# Altium integrated library HMS.PhaoDien.V5.1.IntLib: 91 symbols
Pins are listed as number, name and electrical type; pins without a type are passive.

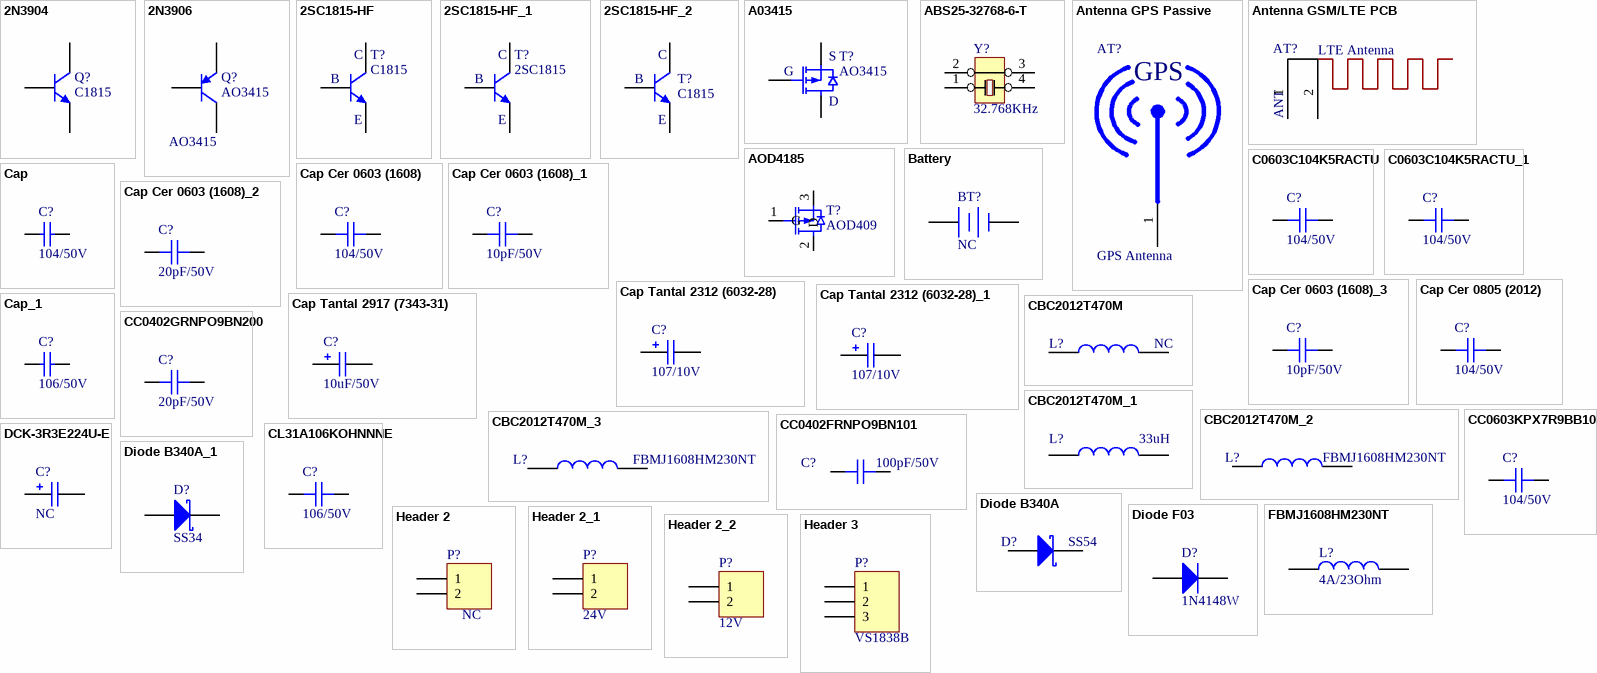
[diagram p0: symbols 2N3904 to Header 3]

## 2N3904
designator Q?, comment C1815
Trans C1815 NPN 0.15A/50V SMD SOT23; MFR: LinhKienChatLuong; MPN: 2SC1815; Published: 8-Jun-2000; LatestRevisionDate: 15-Jan-2003; LatestRevisionNote: PCB Footprint 'BCY-W3/D4.7' replaced; DatasheetVersion: 1997; PackageVersion: Sep-1998; PackageReference: TO-92A; Publisher: Altium Limited; PackageDescription: TO, Flat Index; 3 In-Line, Axial Leads; Body Dia. 4.5mm; Leads 0.51 x 0.48 mm (max); ComponentLink1Description: Manufacturer Link; ComponentLink1URL: http://www.fairchildsemi.com/; ComponentLink2Description: Datasheet; ComponentLink2URL: http://www.fairchildsemi.com/ds/2N%2F2N3904.pdf; Category: Transistor NPN; Value: C1815
footprint SOT23-3
pins: 1 B, 2 E, 3 C

## 2N3906
designator Q?, comment AO3415
Mosfet P Channel; MFR: Alpha & Omega Semiconductor Inc.; Published: 8-Jun-2000; LatestRevisionDate: 15-Jan-2003; LatestRevisionNote: PCB Footprint 'BCY-W3/D4.7' replaced; DatasheetVersion: 1997; PackageVersion: Sep-1998; PackageReference: TO-92A; Publisher: Altium Limited; PackageDescription: TO, Flat Index; 3 In-Line, Axial Leads; Body Dia. 4.5mm; Leads 0.51 x 0.48 mm (max); ComponentLink1Description: Manufacturer Link; ComponentLink1URL: http://www.fairchildsemi.com/; ComponentLink2Description: Datasheet; ComponentLink2URL: http://www.fairchildsemi.com/ds/2N%2F2N3906.pdf; Category: Transistors - FETs, MOSFETs - Single; MPN: AO3415; Value: AO3415
footprint SOT23-3
pins: 1 B, 2 E, 3 C

## 2SC1815-HF
designator T?, comment C1815
Trans C1815 NPN 0.15A/50V SMD SOT23; MPN: 2SC1815; Value: C1815
footprint SOT23-3
footprint SOT23
pins: 1, 2, 3
text: C; B; E

## 2SC1815-HF_1
designator T?, comment 2SC1815
Trans C1815 NPN 0.15A/50V SMD SOT23; MFR: LinhKienChatLuong; Value: 2SC1815; Category: Transistor NPN; MPN: 2SC1815
footprint SOT23-3
footprint SOT23
pins: 1, 2, 3
text: C; B; E

## 2SC1815-HF_2
designator T?, comment C1815
Transistor  50V 150mA  NPN SMD SOT-23; MPN: 2SC1815; Value: C1815
footprint SOT23-3
footprint SOT23
pins: 1, 2, 3
text: C; B; E

## A03415
designator T?, comment AO3415
Mosfet P Channel; MPN: AO3415; Category: Transistor PNP; Value: AO3415
footprint SOT23-3
pins: 1 G, 2 S, 3 D

## ABS25-32768-6-T
designator Y?, comment 32.768KHz
CRYSTAL 32.768KHZ 6PF SMD; Manufacturer: Abracon Corporation; Manufacturer Part Number: ABS25-32.768KHZ-6-T; MPN: ABS25-32768-6-T; Frequency Tolerance: ±20ppm; ESR (Equivalent Series Resistance): 50 kOhm; Operating Mode: Fundamental; Supplier 1: Digi-Key; RoHS: RoHS Compliant; Category: Crystals and Oscillators; Stock 1: 51000; Pricing 1: 3000=0.285, 6000=0.2755, 15000=0.266 (USD); Packaging: Tape & Reel (TR); Type: kHz Crystal (Tuning Fork); Frequency: 32.768kHz; Frequency Stability: -; Load Capacitance: 6pF; Operating Temperature: -40°C ~ 85°C; Ratings: -; Mounting Type: Surface Mount; Package / Case: 4-SOJ, 5.50mm pitch; Size / Dimension: 0.315" L x 0.150" W (8.00mm x 3.80mm); Height: 0.098" (2.50mm); ComponentLink1URL: http://www.abracon.com/Resonators/abs25.pdf; ComponentLink1Description: http://www.abracon.com/Resonators/abs25.pdf; Supplier Part Number 1: 535-10240-2-ND; Value: 32.768KHz
footprint ABS25-32768-6-T (CRYSTAL 32.768KHZ 6PF SMD)
pins: 1, 2, 3, 4

## Antenna GPS Passive
designator AT?, comment GPS Antenna
SWG018-35, Passive antenna 25x25x4mm, pin length 3.5mm, Three-proof varnish; MPN: SW25073IB93; Value: GPS Antenna
footprint ANT GPS Passive
pins: 1 105
text: GPS

## Antenna GSM/LTE PCB
designator AT?, comment LTE Antenna
MPN: NC; Value: LTE Antenna
footprint Antenna LTE/4G PCB
pins: 1 46, 2 47
text: ANT

## AOD4185
designator T?, comment AOD409
MOSFET P-CH 60V 26A TO252; Manufacturer: International Rectifier; FET Type: MOSFET P-Channel, Metal Oxide; FET Feature: Logic Level Gate; Drain to Source Voltage (Vdss): 20V; Current - Continuous Drain (Id) @ 25° C: 3.7A (Ta); Rds On (Max) @ Id, Vgs: 65 mOhm @ 3.7A, 4.5V; Vgs(th) (Max) @ Id: 1.2V @ 250µA; Gate Charge (Qg) @ Vgs: 12nC @ 5V; Input Capacitance (Ciss) @ Vds: 633pF @ 10V; Power - Max: 1.3W; Supplier 1: Digi-Key; RoHS: RoHS Compliant; Category: Discrete Semiconductor Products; Stock 1: 4068; Pricing 1: 1=0.6, 10=0.34, 25=0.2932, 50=0.2468, 100=0.2209, 250=0.20072, 500=0.18058, 1000=0.16904 (USD); Packaging: Digi-Reel®; Mounting Type: Surface Mount; Package / Case: TO-236-3, SC-59, SOT-23-3; Supplier Device Package: Micro3™/SOT-23; ComponentLink1URL: http://www.irf.com/product-info/datasheets/data/irlml6402gpbf.pdf; ComponentLink1Description: http://www.irf.com/product-info/datasheets/data/irlml6402gpbf.pdf; Supplier Part Number 1: IRLML6402GTRPBFDKR-ND; Value: AOD409; MPN: AOD409
footprint TO252
pins: 1 G, 2 D, 3 S

## Battery
designator BT?, comment NC
Published: 24-Mar-1999; LatestRevisionDate: 17-Jul-2002; LatestRevisionNote: Re-released for DXP Platform.; PackageReference: BAT-2; Publisher: Altium Limited; PackageDescription: Battery; 2 Leads; Value: NC
footprint DE PIN NHO 3V3 (Footprint not found)
pins: 1 +, 2 -

## C0603C104K5RACTU
designator C?, comment 104/50V
Tụ Ceramic 104/50V 10% 0603; MPN: CC0603KPX7R9BB104; MFR: YAGEO; CompanyID: VT-00982; Solder: SMT; Value: 104/50V; Category: Ceramic Capacitors
footprint CAPC-0603 (1608) (Resistor, Chip; 1.60 mm L X 0.80 mm W X 0.50 mm H body)
footprint CAP_CERAMIC_0603(1608mm) (Chip Capacitor, Body 1.6x0.8mm, IPC High Density)
footprint CAP_CERAMIC_0402(1005) (Chip Inductor, Body 1.0x0.5mm, IPC High Density)
pins: 1, 2

## C0603C104K5RACTU_1
designator C?, comment 104/50V
CAP CER 0.1UF 50V X5R 0402; MPN: CC0402KRX5R9BB104; CompanyID: VT-00982; Solder: SMT; Value: 104/50V; Category: CAPACITOR
footprint CAP_CERAMIC_0402(1005) (Chip Inductor, Body 1.0x0.5mm, IPC High Density)
pins: 1, 2

## Cap
designator C?, comment 104/50V
CAP CER 0.1UF 50V X5R 0402; MPN: CC0402KRX5R9BB104; Published: 8-Jun-2000; LatestRevisionDate: 17-Jul-2002; LatestRevisionNote: Re-released for DXP Platform.; PackageReference: RAD-0.3; Publisher: Altium Limited; Value: 104/50V
footprint CAP_CERAMIC_0402(1005) (Chip Inductor, Body 1.0x0.5mm, IPC High Density)
pins: 1, 2

## Cap Cer 0603 (1608)
designator C?, comment 104/50V
CAP CER 0.1UF 50V X5R 0402; MPN: CC0402KRX5R9BB104; MFR: YAGEO; Published: 8-Jun-2000; LatestRevisionDate: 17-Jul-2002; LatestRevisionNote: Re-released for DXP Platform.; PackageReference: RAD-0.3; Publisher: Altium Limited; Value: 104/50V; Category: Ceramic Capacitors
footprint CAP_CERAMIC_0603(1608mm) (Chip Capacitor, Body 1.6x0.8mm, IPC High Density)
footprint CAP_CERAMIC_0402(1005) (Chip Inductor, Body 1.0x0.5mm, IPC High Density)
pins: 1, 2

## Cap Cer 0603 (1608)_1
designator C?, comment 10pF/50V
CAP CER 0.1UF 50V X5R 0402; MPN: CC0402KRX5R9BB104; MFR: YAGEO; Published: 8-Jun-2000; LatestRevisionDate: 17-Jul-2002; LatestRevisionNote: Re-released for DXP Platform.; PackageReference: RAD-0.3; Publisher: Altium Limited; Value: 10pF/50V; Category: Ceramic Capacitors
footprint CAP_CERAMIC_0603(1608mm) (Chip Capacitor, Body 1.6x0.8mm, IPC High Density)
footprint CAP_CERAMIC_0402(1005) (Chip Inductor, Body 1.0x0.5mm, IPC High Density)
pins: 1, 2

## Cap Cer 0603 (1608)_2
designator C?, comment 20pF/50V
CAP CER 20PF 50V C0G/NP0 0402; MPN: CQ0402FRNPO9BN200; Published: 8-Jun-2000; LatestRevisionDate: 17-Jul-2002; LatestRevisionNote: Re-released for DXP Platform.; PackageReference: RAD-0.3; Publisher: Altium Limited; Value: 20pF/50V
footprint CAP_CERAMIC_0402(1005) (Chip Inductor, Body 1.0x0.5mm, IPC High Density)
pins: 1, 2

## Cap Cer 0603 (1608)_3
designator C?, comment 10pF/50V
CAP CER 10pF 50V NP0 0402; MPN: CC0402JRNPO9BN100; Published: 8-Jun-2000; LatestRevisionDate: 17-Jul-2002; LatestRevisionNote: Re-released for DXP Platform.; PackageReference: RAD-0.3; Publisher: Altium Limited; Value: 10pF/50V
footprint CAP_CERAMIC_0402(1005) (Chip Inductor, Body 1.0x0.5mm, IPC High Density)
pins: 1, 2

## Cap Cer 0805 (2012)
designator C?, comment 104/50V
CAP CER 0.1UF 50V X5R 0402; MPN: CC0402KRX5R9BB104; Published: 8-Jun-2000; LatestRevisionDate: 17-Jul-2002; LatestRevisionNote: Re-released for DXP Platform.; PackageReference: RAD-0.3; Publisher: Altium Limited; Value: 104/50V
footprint CAP_CERAMIC_0402(1005) (Chip Inductor, Body 1.0x0.5mm, IPC High Density)
pins: 1, 2

## Cap Tantal 2312 (6032-28)
designator C?, comment 107/10V
Cap Tantal 10uF/6.3V 10% 1206; MPN: 293D106X96R3A2TE3; Value: 107/10V
footprint CAP_TANTAL_1206(3216-18) (Chip Capacitor, Body 3.2x1.6mm, IPC High Density)
pins: 1, 2

## Cap Tantal 2312 (6032-28)_1
designator C?, comment 107/10V
Capacitor Tantalum 100uF/10V 2312(6032-28); MPN: TPSC107K010R0100; Value: 107/10V
footprint CAP_TANTAL_2312(6032-28) (Chip Resistor, Body 6.0x3.2mm, IPC High Density)
pins: 1, 2

## Cap Tantal 2917 (7343-31)
designator C?, comment 10uF/50V
Capacitor Alum 10uF/50V SMD 5x5.4mm; MPN: AVS106M50C12T-F; Value: 10uF/50V
footprint CAP_TANTAL_2917(7343-31) (Chip Resistor, Body 6.0x3.2mm, IPC High Density)
footprint CAP_ALUM_SMD_5054_TYPE_C
pins: 1, 2

## Cap_1
designator C?, comment 106/50V
CAP Ceramic 106/50V 10% 1206; MPN: CL31A106KBHNNNE; Published: 8-Jun-2000; LatestRevisionDate: 17-Jul-2002; LatestRevisionNote: Re-released for DXP Platform.; PackageReference: RAD-0.3; Publisher: Altium Limited; Value: 106/50V
footprint CAP_CERAMIC_1810
footprint CAP_CERAMIC_1206(3216-18) (Chip Capacitor, Body 3.2x1.6mm, IPC High Density)
pins: 1, 2

## CBC2012T470M
designator L?, comment NC
47nH; Manufacturer: Taiyo Yuden; Manufacturer Part Number: CBC2012T470M; Inductance: 200nH; Current Rating: 150mA; Current - Saturation: 120mA; Tolerance: ±20%; Shielding: Unshielded; DC Resistance (DCR): 7.54 Ohm Max; Frequency - Self Resonant: 11MHz; Frequency - Test: 2.52MHz; Supplier 1: Digi-Key; RoHS: RoHS Compliant; Category: Inductors, Coils, Chokes; Stock 1: 108934; Pricing 1: 1=0.2, 10=0.188, 50=0.1762, 100=0.1645, 500=0.12926, 1000=0.10575 (USD); Packaging: Cut Tape (CT); Type: -; Material - Core: -; Q @ Freq: -; Operating Temperature: -40°C ~ 105°C; Package / Case: 0805 (2012 Metric); Size / Dimension: 0.079" L x 0.049" W x 0.049" H (2.00mm x 1.25mm x 1.25mm); Mounting Type: Surface Mount; ComponentLink1URL: http://www.yuden.co.jp/ut/product/category/inductor/CBC2012T470M.pdf; ComponentLink1Description: http://www.yuden.co.jp/ut/product/category/inductor/CBC2012T470M.pdf; Supplier Part Number 1: 587-1605-1-ND; Value: NC; MPN: NC
footprint Inductor_0603 (HK1608R22J-T)
pins: 1, 2

## CBC2012T470M_1
designator L?, comment 33uH
INDUCTOR 33uH SMD CDRH127-330; Manufacturer: Taiyo Yuden; Manufacturer Part Number: CBC2012T470M; Inductance: 47uH; Current Rating: 150mA; Current - Saturation: 120mA; Tolerance: ±20%; Shielding: Unshielded; DC Resistance (DCR): 7.54 Ohm Max; Frequency - Self Resonant: 11MHz; Frequency - Test: 2.52MHz; Supplier 1: Digi-Key; RoHS: RoHS Compliant; Category: Inductors, Coils, Chokes; Stock 1: 108934; Pricing 1: 1=0.2, 10=0.188, 50=0.1762, 100=0.1645, 500=0.12926, 1000=0.10575 (USD); Packaging: Cut Tape (CT); Type: -; Material - Core: -; Q @ Freq: -; Operating Temperature: -40°C ~ 105°C; Package / Case: 0805 (2012 Metric); Size / Dimension: 0.079" L x 0.049" W x 0.049" H (2.00mm x 1.25mm x 1.25mm); Mounting Type: Surface Mount; ComponentLink1URL: http://www.yuden.co.jp/ut/product/category/inductor/CBC2012T470M.pdf; ComponentLink1Description: http://www.yuden.co.jp/ut/product/category/inductor/CBC2012T470M.pdf; Supplier Part Number 1: 587-1605-1-ND; Value: 33uH; MPN: CDRH127-330
footprint L3A_10x10x4mm
pins: 1, 2

## CBC2012T470M_2
designator L?, comment FBMJ1608HM230NT
Inductor Ferrites 4A SMD 0603; Manufacturer: Taiyo Yuden; Manufacturer Part Number: CBC2012T470M; Inductance: 200nH; Current Rating: 150mA; Current - Saturation: 120mA; Tolerance: ±20%; Shielding: Unshielded; DC Resistance (DCR): 7.54 Ohm Max; Frequency - Self Resonant: 11MHz; Frequency - Test: 2.52MHz; Supplier 1: Digi-Key; RoHS: RoHS Compliant; Category: Inductors, Coils, Chokes; Stock 1: 108934; Pricing 1: 1=0.2, 10=0.188, 50=0.1762, 100=0.1645, 500=0.12926, 1000=0.10575 (USD); Packaging: Cut Tape (CT); Type: -; Material - Core: -; Q @ Freq: -; Operating Temperature: -40°C ~ 105°C; Package / Case: 0805 (2012 Metric); Size / Dimension: 0.079" L x 0.049" W x 0.049" H (2.00mm x 1.25mm x 1.25mm); Mounting Type: Surface Mount; ComponentLink1URL: http://www.yuden.co.jp/ut/product/category/inductor/CBC2012T470M.pdf; ComponentLink1Description: http://www.yuden.co.jp/ut/product/category/inductor/CBC2012T470M.pdf; Supplier Part Number 1: 587-1605-1-ND; Value: FBMJ1608HM230NT; MPN: FBMJ1608HM230NT
footprint Inductor_0603 (HK1608R22J-T)
pins: 1, 2

## CBC2012T470M_3
designator L?, comment FBMJ1608HM230NT
INDUCTOR 200nH 20% 0805 SMD; MFR: Taiyo Yuden; Current Rating: 150mA; Current - Saturation: 120mA; Shielding: Unshielded; DC Resistance (DCR): 7.54 Ohm Max; Frequency - Self Resonant: 11MHz; Frequency - Test: 2.52MHz; Supplier 1: Digi-Key; RoHS: RoHS Compliant; Category: Inductors, Coils, Chokes; Stock 1: 108934; Pricing 1: 1=0.2, 10=0.188, 50=0.1762, 100=0.1645, 500=0.12926, 1000=0.10575 (USD); Packaging: Cut Tape (CT); Type: -; Inductance: 200nH; Tolerance: ±20%; Material - Core: -; Q @ Freq: -; Operating Temperature: -40°C ~ 105°C; Package / Case: 0805 (2012 Metric); Size / Dimension: 0.079" L x 0.049" W x 0.049" H (2.00mm x 1.25mm x 1.25mm); Mounting Type: Surface Mount; ComponentLink1URL: http://www.yuden.co.jp/ut/product/category/inductor/CBC2012T470M.pdf; ComponentLink1Description: http://www.yuden.co.jp/ut/product/category/inductor/CBC2012T470M.pdf; Supplier Part Number 1: 587-1605-1-ND; Value: FBMJ1608HM230NT; MPN: FBMJ1608HM230NT
footprint Inductor_0603 (HK1608R22J-T)
pins: 1, 2

## CC0402FRNPO9BN101
designator C?, comment 100pF/50V
CAP CER 100PF 50V C0G/NPO 0402; MPN: CC0402JRNPO9BN101; MFR: YAGEO; Category: Ceramic Capacitors; Value: 100pF/50V
footprint CAP_CERAMIC_0402(1005) (Chip Inductor, Body 1.0x0.5mm, IPC High Density)
pins: 1, 2

## CC0402GRNPO9BN200
designator C?, comment 20pF/50V
CAP CER 20PF 50V C0G/NPO 0402; MFR: YAGEO; MPN: CC0402GRNPO9BN200; Value: 20pF/50V; Category: Ceramic Capacitors
footprint CAP_CERAMIC_0402(1005) (Chip Inductor, Body 1.0x0.5mm, IPC High Density)
pins: 1, 2

## CC0603KPX7R9BB104
designator C?, comment 104/50V
CAP CER 0.1UF 50V X5R 0402; MPN: CC0402KRX5R9BB104; MFR: YAGEO; Value: 104/50V; Category: Ceramic Capacitors
footprint CAP_CERAMIC_0603(1608mm) (Chip Capacitor, Body 1.6x0.8mm, IPC High Density)
footprint CAP_CERAMIC_0402(1005) (Chip Inductor, Body 1.0x0.5mm, IPC High Density)
pins: 1, 2

## CL31A106KOHNNNE
designator C?, comment 106/50V
CAP Ceramic 106/50V 10% 1206; MPN: CL31A106KBHNNNE; MFR: YAGEO; Value: 106/50V
footprint CAP_CERAMIC_1206(3216-18) (Chip Capacitor, Body 3.2x1.6mm, IPC High Density)
pins: 1, 2

## DCK-3R3E224U-E
designator C?, comment NC
MFR: Elna America; Capacitance: 220mF; Voltage - Rated: 3.3V; Tolerance: -20%, +80%; ESR (Equivalent Series Resistance): 200 Ohm; Lifetime @ Temp.: 1000 Hrs @ 60°C; Published: 24-Mar-1999; LatestRevisionDate: 17-Jul-2002; LatestRevisionNote: Re-released for DXP Platform.; PackageReference: BAT-2; Publisher: Altium Limited; PackageDescription: Battery; 2 Leads; Supplier 1: Digi-Key; MPN: NC; RoHS: RoHS Compliant; Category: Capacitors; Stock 1: 7810; Pricing 1: 1=1.41, 10=1.114, 25=1.0208, 50=0.9652, 100=0.8352, 250=0.7424, 500=0.63104, 1000=0.5568, 2500=0.51968 (USD); Packaging: Bulk; Mounting Type: Surface Mount; Package / Case: Coin, Wide Terminals - Opposite Sides; Lead Spacing: 0.079" (2.00mm); Size / Dimension: 0.268" Dia (6.80mm); Height - Seated (Max): 0.083" (2.10mm); Operating Temperature: -10°C ~ 60°C; ComponentLink1URL: http://media.digikey.com/pdf/Data%20Sheets/Elna%20America%20Inc/DC_DCKe.pdf; ComponentLink1Description: http://media.digikey.com/pdf/Data%20Sheets/Elna%20America%20Inc/DC_DCKe.pdf; Supplier Part Number 1: 604-1007-ND; Value: NC
footprint SPCAP0.22F
pins: 1, 2

## Diode B340A
designator D?, comment SS54
Diode Schottky 5A/40V DO-214AB; Published: 8-Jun-2000; LatestRevisionDate: 17-Jul-2002; LatestRevisionNote: Re-released for DXP Platform.; PackageReference: SMB; Publisher: Altium Limited; Code_JEDEC: DO-214-AA; MPN: SS54; Value: SS54
footprint DO214AC_SMA_1808 (Diode B340, Diode M7)
pins: 1 A, 2 K

## Diode B340A_1
designator D?, comment SS34
Diode Schottky 3A/40V DO-214AB; MFR: Diodes Incorporated; Published: 8-Jun-2000; LatestRevisionDate: 17-Jul-2002; LatestRevisionNote: Re-released for DXP Platform.; PackageReference: SMB; Publisher: Altium Limited; Code_JEDEC: DO-214-AA; Value: SS34; MPN: SS34; Category: Diodes - Rectifiers - Single
footprint DO214AC_SMA_1808 (Diode B340, Diode M7)
pins: 1 A, 2 K

## Diode F03
designator D?, comment 1N4148W
1N4148 T4 SOD-123/1206 1N4148W; MFR: LinhKienChatLuong; Value: 1N4148W; Category: Diode; MPN: 1N4148W
footprint DIODE_F03_1005
pins: 1 A, 2 K

## FBMJ1608HM230NT
designator L?, comment 4A/23Ohm
Inductor Ferrites 4A SMD 0603; MPN: NC; MFR: Taiyo Yuden; Category: Ferrite Beads and Chips; Value: 4A/23Ohm
footprint Inductor_0603 (HK1608R22J-T)
pins: 1, 2

## Header 2
designator P?, comment NC
Header, 2-Pin; LatestRevisionDate: 17-Jul-2002; LatestRevisionNote: Re-released for DXP Platform.; Publisher: Altium Limited; Value: NC; MPN: NC
signal-integrity model Connector
footprint H2_BIG (Euro Block)
pins: 1, 2

## Header 2_1
designator P?, comment 24V
Header, 2-Pin; MPN: NC; LatestRevisionDate: 17-Jul-2002; LatestRevisionNote: Re-released for DXP Platform.; Publisher: Altium Limited
footprint HDR1X2 (Connector; Header; 2 Position)
signal-integrity model Connector
pins: 1, 2

## Header 2_2
designator P?, comment 12V
Header, 2-Pin; MPN: NC; LatestRevisionDate: 17-Jul-2002; LatestRevisionNote: Re-released for DXP Platform.; Publisher: Altium Limited
footprint HDR1X2 (Connector; Header; 2 Position)
signal-integrity model Connector
pins: 1, 2

## Header 3
designator P?, comment VS1838B
Diode Infrared Receiver 38Khz; LatestRevisionDate: 17-Jul-2002; LatestRevisionNote: Re-released for DXP Platform.; Publisher: Altium Limited; Value: VS1838B; MPN: VS1838B
signal-integrity model Connector
footprint IR_RECEIVER (TO, Flat Index; 3 In-Line, Axial Leads; Body Dia. 4.8mm; Leads 0.55 x 0.51 mm (max))
pins: 1, 2, 3

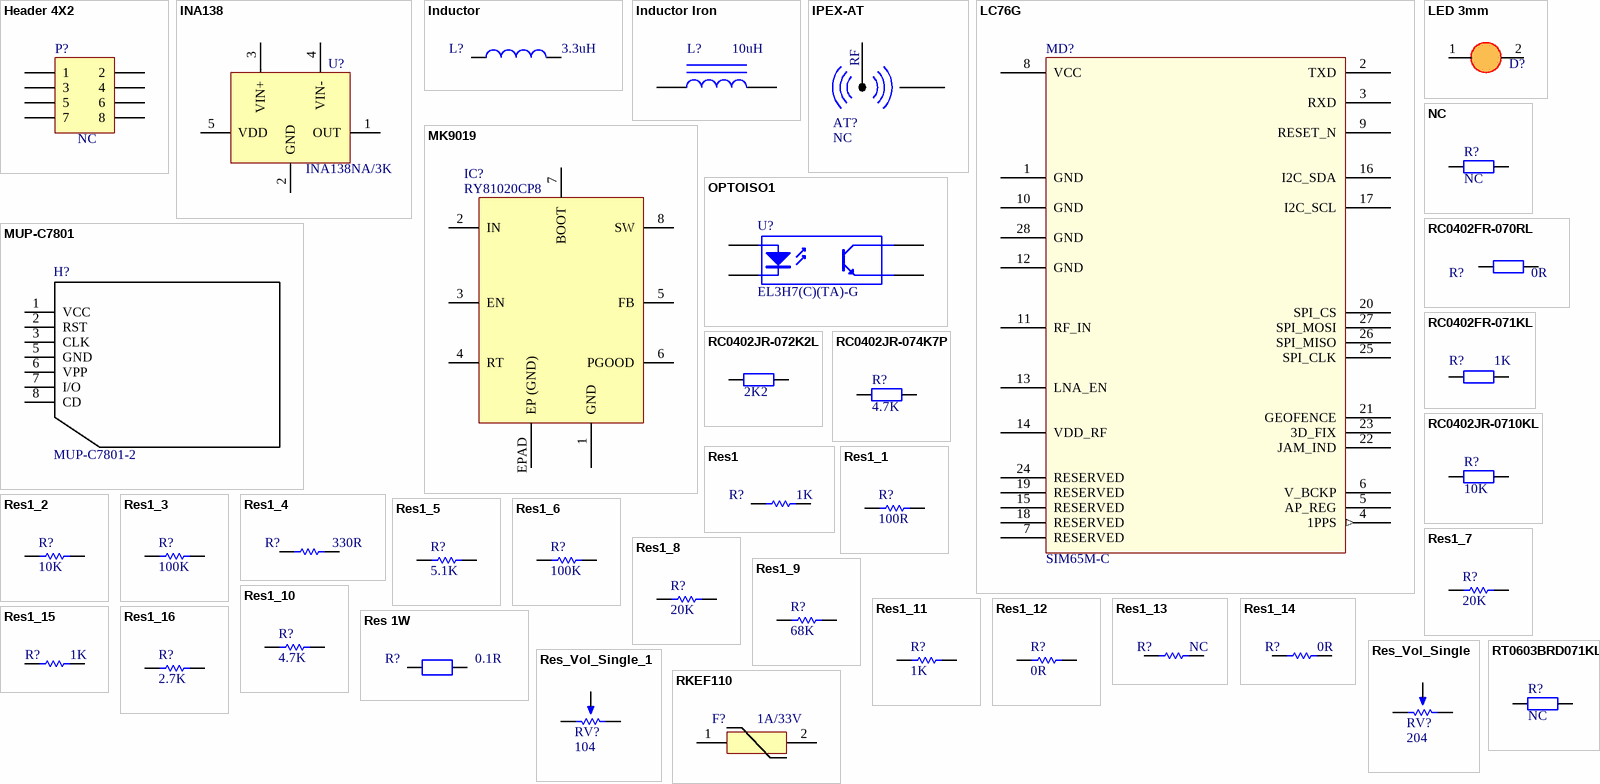
[diagram p1: symbols Header 4X2 to RT0603BRD071KL]

## Header 4X2
designator P?, comment NC
Header, 4-Pin, Dual row; LatestRevisionDate: 17-Jul-2002; LatestRevisionNote: Re-released for DXP Platform.; Publisher: Altium Limited; MPN: NC; Value: NC
footprint HDR2X4 (Connector; Header; 4x2 Position)
signal-integrity model Connector
pins: 1, 2, 3, 4, 5, 6, 7, 8

## INA138
designator U?, comment INA138NA/3K
IC Current Monitor Regulator 0.5% SOT-23-5; Value: INA138NA/3K; MPN: INA138NA/3K
footprint SOT23-5
pins: 1 OUT, 2 GND, 3 VIN+, 4 VIN-, 5 VDD

## Inductor
designator L?, comment 3.3uH
Inductor SMD 3.3uH CD43-3R3 3.5*3*2.1mm; MPN: XRCD43-3R3M; Published: 8-Jun-2000; Revision: July-2002: Re-released for DXP Platform.; Publisher: Altium Limited; Value: 3.3uH
footprint L2.1A_4.5X4X3.2
footprint L2.1A_3.5_3.3
pins: 1, 2

## Inductor Iron
designator L?, comment 10uH
Inductor 10uH 7x7x4mm; MPN: YPRH0704-100M; Published: 24-Mar-1999; LatestRevisionDate: 17-Jul-2002; LatestRevisionNote: Re-released for DXP Platform.; PackageReference: AXIAL-0.9; Publisher: Altium Limited; Value: 10uH
footprint INDUCTOR_SMD_10x10mm
simulation model INDUCTOR (Inductor)
signal-integrity model Inductor Iron
footprint LT54-3R3M (SMD Un-Shielded Inductor)
footprint L3A_7x7x3mm
pins: 1, 2

## IPEX-AT
designator AT?, comment NC
IPEX SMD; MPN: U.FL-R-SMT-1(80); Value: NC
footprint IPEX SMD (IPEX Connector SMD)
pins: 1 5, 2 6
text: RF

## LC76G
designator MD?, comment SIM65M-C
Compact GNSS Module; MPN: SIM65M-C; Value: SIM65M-C
footprint LC76G_GPS (Modlue GNSS)
pins: 1 GND, 2 TXD, 3 RXD, 4 1PPS (out), 5 AP_REG, 6 V_BCKP, 7 RESERVED, 8 VCC, 9 RESET_N, 10 GND, 11 RF_IN, 12 GND, 13 LNA_EN, 14 VDD_RF, 15 RESERVED, 16 I2C_SDA, 17 I2C_SCL, 18 RESERVED, 19 RESERVED, 20 SPI_CS, 21 GEOFENCE, 22 JAM_IND, 23 3D_FIX, 24 RESERVED, 25 SPI_CLK, 26 SPI_MISO, 27 SPI_MOSI, 28 GND

## LED 3mm
designator D?, comment LED Red  (value not drawn)
LED RED SMD 0402; MPN: NCD0603R1; Value: LED Red
footprint LED_0603_GREEN (Chip Capacitor, Body 1.6x0.8mm, IPC High Density)
pins: 1 A, 2 K

## MK9019
designator IC?, comment RY81020CP8
100V Input, Ultra-Low IQ, Synchronous Buck Converter; Value: RY81020CP8; MPN: RY81020CP8
footprint MK9019
pins: 1 GND, 2 IN, 3 EN, 4 RT, 5 FB, 6 PGOOD, 7 BOOT, 8 SW, EPAD EP (GND)

## MUP-C7801
designator H?, comment MUP-C7801-2
Nano Sim card Socket; MFR: OEM; MPN: MUP-C7801-2; Value: MUP-C7801-2
footprint MUP-C7801 (Push-Push NANO-SIM Card)
pins: 1 VCC, 2 RST, 3 CLK, 5 GND, 6 VPP, 7 I/O, 8 CD

## NC
designator R?
MPN: NC; Value: NC; Category: 0402
footprint RES_0402(1005) (Chip Inductor, Body 1.0x0.5mm, IPC High Density)
pins: 1, 2

## OPTOISO1
designator U?, comment EL3H7(C)(TA)-G
Optoisolator Transistor Output 3750Vrms 1 Channel 4-SOP; MFR: Vishay Semiconductor Opto Division; Component Type: IC; MPN: EL3H7(C)(TA)-G; Value: EL3H7(C)(TA)-G; Category: Optoisolators - Transistor, Photovoltaic Output
footprint Opto small
pins: 1, 2, 3, 4

## RC0402FR-070RL
designator R?, comment 0R
RES 0 OHM JUMPER 1/16W 0402; MPN: RC0402FR-070RL; MFR: YAGEO; Category: Chip Resistor - Surface Mount; Value: 0R
footprint RES_0402(1005) (Chip Inductor, Body 1.0x0.5mm, IPC High Density)
pins: 1, 2

## RC0402FR-071KL
designator R?, comment 1K
RES 1K OHM 1% 1/8W 0402; MPN: RC0402FR-071KL; MFR: YAGEO; Voltage Rating: 50V; Power Rating: 1/16W; Value: 1K; Category: 0402; Tolerance: 1%
footprint RES_0402(1005) (Chip Inductor, Body 1.0x0.5mm, IPC High Density)
pins: 1, 2

## RC0402JR-072K2L
designator R?, comment 2K2
RES 2.2K OHM 1/8W 0402; MPN: RC0402JR-072K2L; MFR: YAGEO; Value: 2K2; Category: Chip Resistor - Surface Mount
footprint RES_0402(1005) (Chip Inductor, Body 1.0x0.5mm, IPC High Density)
pins: 1, 2

## RC0402JR-074K7P
designator R?, comment 4.7K
RES SMD 4.7K OHM 5% 1/16W 0402; MPN: RC0402JR-074K7P; MFR: YAGEO; Category: Chip Resistor - Surface Mount; Value: 4.7K
footprint RES_0402(1005) (Chip Inductor, Body 1.0x0.5mm, IPC High Density)
pins: 1, 2

## RC0402JR-0710KL
designator R?, comment 10K
RES 10K OHM 5% 1/8W 0402; MPN: RC0402JR-0710KL; MFR: YAGEO; Category: Chip Resistor - Surface Mount; Value: 10K
footprint RES_0402(1005) (Chip Inductor, Body 1.0x0.5mm, IPC High Density)
pins: 1, 2

## Res1
designator R?, comment 1K
RES 1K OHM 1% 1/8W 0402; MPN: RC0402FR-071KL; Published: 8-Jun-2000; LatestRevisionDate: 17-Jul-2002; LatestRevisionNote: Re-released for DXP Platform.; PackageReference: AXIAL-0.3; Publisher: Altium Limited; Value: 1K
footprint RES_0402(1005) (Chip Inductor, Body 1.0x0.5mm, IPC High Density)
pins: 1, 2

## Res1_1
designator R?, comment 100R
RES 100 OHM 1% 1/8W 0402; MPN: RC0402FR-7W100RL; MFR: Vishay Dale; Published: 8-Jun-2000; LatestRevisionDate: 17-Jul-2002; LatestRevisionNote: Re-released for DXP Platform.; PackageReference: AXIAL-0.3; Publisher: Altium Limited; Value: 100R; Category: Chip Resistor - Surface Mount
footprint RES_0603(1608) (Chip Inductor, Body 0.6x0.3mm, IPC High Density)
footprint RES_0402(1005) (Chip Inductor, Body 1.0x0.5mm, IPC High Density)
pins: 1, 2

## Res1_2
designator R?, comment 10K
RES 10K OHM 5% 1/8W 0402; MPN: RC0402JR-0710KL; Published: 8-Jun-2000; LatestRevisionDate: 17-Jul-2002; LatestRevisionNote: Re-released for DXP Platform.; PackageReference: AXIAL-0.3; Publisher: Altium Limited; Value: 10K
footprint RES_0402(1005) (Chip Inductor, Body 1.0x0.5mm, IPC High Density)
pins: 1, 2

## Res1_3
designator R?, comment 100K
Resistor 100K 1/8W 1% 0402; MPN: RC0402FR-07100KL; Published: 8-Jun-2000; LatestRevisionDate: 17-Jul-2002; LatestRevisionNote: Re-released for DXP Platform.; PackageReference: AXIAL-0.3; Publisher: Altium Limited; Value: 100K
footprint RES_0402(1005) (Chip Inductor, Body 1.0x0.5mm, IPC High Density)
pins: 1, 2

## Res1_4
designator R?, comment 330R
RES 330 OHM 1% 1/8W 0402; MPN: RC0402FR-07330RL; Published: 8-Jun-2000; LatestRevisionDate: 17-Jul-2002; LatestRevisionNote: Re-released for DXP Platform.; PackageReference: AXIAL-0.3; Publisher: Altium Limited; Value: 330R
footprint RES_0402(1005) (Chip Inductor, Body 1.0x0.5mm, IPC High Density)
pins: 1, 2

## Res1_5
designator R?, comment 5.1K
RES 5.1K OHM 5% 1/8W 0402; MPN: RC0402JR-075K1L; Published: 8-Jun-2000; LatestRevisionDate: 17-Jul-2002; LatestRevisionNote: Re-released for DXP Platform.; PackageReference: AXIAL-0.3; Publisher: Altium Limited; Value: 5.1K
footprint RES_0402(1005) (Chip Inductor, Body 1.0x0.5mm, IPC High Density)
pins: 1, 2

## Res1_6
designator R?, comment 100K
RES 100K OHM 5% 1/8W 0402; MPN: RC0402JR-07100KL; Published: 8-Jun-2000; LatestRevisionDate: 17-Jul-2002; LatestRevisionNote: Re-released for DXP Platform.; PackageReference: AXIAL-0.3; Publisher: Altium Limited; Value: 100K
footprint RES_0402(1005) (Chip Inductor, Body 1.0x0.5mm, IPC High Density)
pins: 1, 2

## Res1_7
designator R?, comment 20K
RES 20K OHM 1% 1/8W 0402; MPN: RC0402FR-0720KL; MFR: YAGEO; Published: 8-Jun-2000; LatestRevisionDate: 17-Jul-2002; LatestRevisionNote: Re-released for DXP Platform.; PackageReference: AXIAL-0.3; Publisher: Altium Limited; Value: 20K; Category: Chip Resistor - Surface Mount
footprint RES_0603(1608) (Chip Inductor, Body 0.6x0.3mm, IPC High Density)
footprint RES_0402(1005) (Chip Inductor, Body 1.0x0.5mm, IPC High Density)
pins: 1, 2

## Res1_8
designator R?, comment 20K
RES 20K OHM 5% 1/8W 0402; MPN: RC0402FR-0720KL; MFR: Stackpole Electronics Inc; Published: 8-Jun-2000; LatestRevisionDate: 17-Jul-2002; LatestRevisionNote: Re-released for DXP Platform.; PackageReference: AXIAL-0.3; Publisher: Altium Limited; Value: 20K; Category: Chip Resistor - Surface Mount
footprint RES_0603(1608) (Chip Inductor, Body 0.6x0.3mm, IPC High Density)
footprint RES_0402(1005) (Chip Inductor, Body 1.0x0.5mm, IPC High Density)
pins: 1, 2

## Res1_9
designator R?, comment 68K
RES 68K OHM 5% 1/8W 0402; MPN: RC0402FR-0768KL; Published: 8-Jun-2000; LatestRevisionDate: 17-Jul-2002; LatestRevisionNote: Re-released for DXP Platform.; PackageReference: AXIAL-0.3; Publisher: Altium Limited; Value: 68K
footprint RES_0603(1608) (Chip Inductor, Body 0.6x0.3mm, IPC High Density)
footprint RES_0402(1005) (Chip Inductor, Body 1.0x0.5mm, IPC High Density)
pins: 1, 2

## Res1_10
designator R?, comment 4.7K
RES 4.7K 1% 1/8W 0402; MFR: YAGEO; MPN: RC0402FR-074K7L; Published: 8-Jun-2000; LatestRevisionDate: 17-Jul-2002; LatestRevisionNote: Re-released for DXP Platform.; PackageReference: AXIAL-0.3; Publisher: Altium Limited; PackageDescription: Axial Device, Thru-Hole; 2 Leads; 0.3 in Pin Spacing; Value: 4.7K; Category: Chip Resistor - Surface Mount
footprint RES_0603(1608) (Chip Inductor, Body 0.6x0.3mm, IPC High Density)
footprint 0603
footprint RES_0402(1005) (Chip Inductor, Body 1.0x0.5mm, IPC High Density)
pins: 1, 2

## Res1_11
designator R?, comment 1K
Trở 1K 1/8W 1% 0603; MPN: RC0402FR-071KL; MFR: YAGEO; Published: 8-Jun-2000; LatestRevisionDate: 17-Jul-2002; LatestRevisionNote: Re-released for DXP Platform.; PackageReference: AXIAL-0.3; Publisher: Altium Limited; PackageDescription: Axial Device, Thru-Hole; 2 Leads; 0.3 in Pin Spacing; Value: 1K; Category: Chip Resistor - Surface Mount
footprint RES_0603(1608) (Chip Inductor, Body 0.6x0.3mm, IPC High Density)
footprint 0603
footprint RES_0402(1005) (Chip Inductor, Body 1.0x0.5mm, IPC High Density)
pins: 1, 2

## Res1_12
designator R?, comment value 0R  (hidden comment: NC)
Trở 10K 1/8W 1% 0603; MFR: YAGEO; MPN: RT0603DRD0710KL; Published: 8-Jun-2000; LatestRevisionDate: 17-Jul-2002; LatestRevisionNote: Re-released for DXP Platform.; PackageReference: AXIAL-0.3; Publisher: Altium Limited; PackageDescription: Axial Device, Thru-Hole; 2 Leads; 0.3 in Pin Spacing; Category: Chip Resistor - Surface Mount; Value1: NC
footprint RES_0603(1608) (Chip Inductor, Body 0.6x0.3mm, IPC High Density)
footprint 0603
footprint RES_0402(1005) (Chip Inductor, Body 1.0x0.5mm, IPC High Density)
pins: 1, 2

## Res1_13
designator R?, comment NC
Resistor; Published: 8-Jun-2000; LatestRevisionDate: 17-Jul-2002; LatestRevisionNote: Re-released for DXP Platform.; PackageReference: AXIAL-0.3; Publisher: Altium Limited; Value: NC
footprint RES_0402(1005) (Chip Inductor, Body 1.0x0.5mm, IPC High Density)
pins: 1, 2

## Res1_14
designator R?, comment 0R
RES 0 OHM 1/8W 0402; MPN: CRCW04020000Z0EDC; Published: 8-Jun-2000; LatestRevisionDate: 17-Jul-2002; LatestRevisionNote: Re-released for DXP Platform.; PackageReference: AXIAL-0.3; Publisher: Altium Limited; Value: 0R
footprint RES_0402(1005) (Chip Inductor, Body 1.0x0.5mm, IPC High Density)
pins: 1, 2

## Res1_15
designator R?, comment 1K
Resistor 1K 1/8W 1% 0603; MPN: RC0402FR-071KL; Published: 8-Jun-2000; LatestRevisionDate: 17-Jul-2002; LatestRevisionNote: Re-released for DXP Platform.; PackageReference: AXIAL-0.3; Publisher: Altium Limited; Value: 1K
footprint RES_0402(1005) (Chip Inductor, Body 1.0x0.5mm, IPC High Density)
pins: 1, 2

## Res1_16
designator R?, comment 2.7K
RES 2.7K OHM 5% 1/8W 0402; MPN: RC0402JR-072K7L; MFR: YAGEO; Published: 8-Jun-2000; LatestRevisionDate: 17-Jul-2002; LatestRevisionNote: Re-released for DXP Platform.; PackageReference: AXIAL-0.3; Publisher: Altium Limited; PackageDescription: Axial Device, Thru-Hole; 2 Leads; 0.3 in Pin Spacing; Value: 2.7K; Category: Chip Resistor - Surface Mount
footprint 0603
footprint RES_0402(1005) (Chip Inductor, Body 1.0x0.5mm, IPC High Density)
pins: 1, 2

## Res 1W
designator R?, comment 0.1R
Res 1W 0.1R 1% SMD 2512; MPN: RL2512FK-070R1L; Value: 0.1R
footprint RES_2512
pins: 1, 2

## Res_Vol_Single
designator RV?, comment 204
Volume Varistor Single 200K; MPN: 3296W-204; Sim Note: Enter the Resistance value and the set point into parameter fields.; Set Position: 0.5; Published: 8-Jun-2000; LatestRevisionDate: 17-Jul-2002; LatestRevisionNote: Re-released for DXP Platform.; PackageReference: 3296W-204; Publisher: Altium Limited; Value: 204
footprint RES_VAR_Type1 (Bien tro vi chinh)
pins: 1, 2, 3

## Res_Vol_Single_1
designator RV?, comment 104
Volume Varistor Single 100K; MPN: 3296W-104; Sim Note: Enter the Resistance value and the set point into parameter fields.; Set Position: 0.5; Published: 8-Jun-2000; LatestRevisionDate: 17-Jul-2002; LatestRevisionNote: Re-released for DXP Platform.; PackageReference: VR5; Publisher: Altium Limited; Value: 104
footprint RES_VAR_Type1 (Bien tro vi chinh)
pins: 1, 2, 3

## RKEF110
designator F?, comment 1A/33V
PTC RESET FUSE 33V 1A SMD 1812; MPN: KMC5S110RY33; MFR: Littelfuse Inc.; Solder: WAVE; Value: 1A/33V
footprint FUSE-RUEF300 (PTC Resettable Fuses - 3A)
footprint RUEF300 (PTC Resettable Fuses - 3A)
footprint MF-MSMF
pins: 1, 2

## RT0603BRD071KL
designator R?, comment NC
MPN: RC0402FR-131KL; MFR: YAGEO; Value: NC; Category: Chip Resistor - Surface Mount
footprint RES_0603(1608) (Chip Inductor, Body 0.6x0.3mm, IPC High Density)
footprint RES_0402(1005) (Chip Inductor, Body 1.0x0.5mm, IPC High Density)
pins: 1, 2

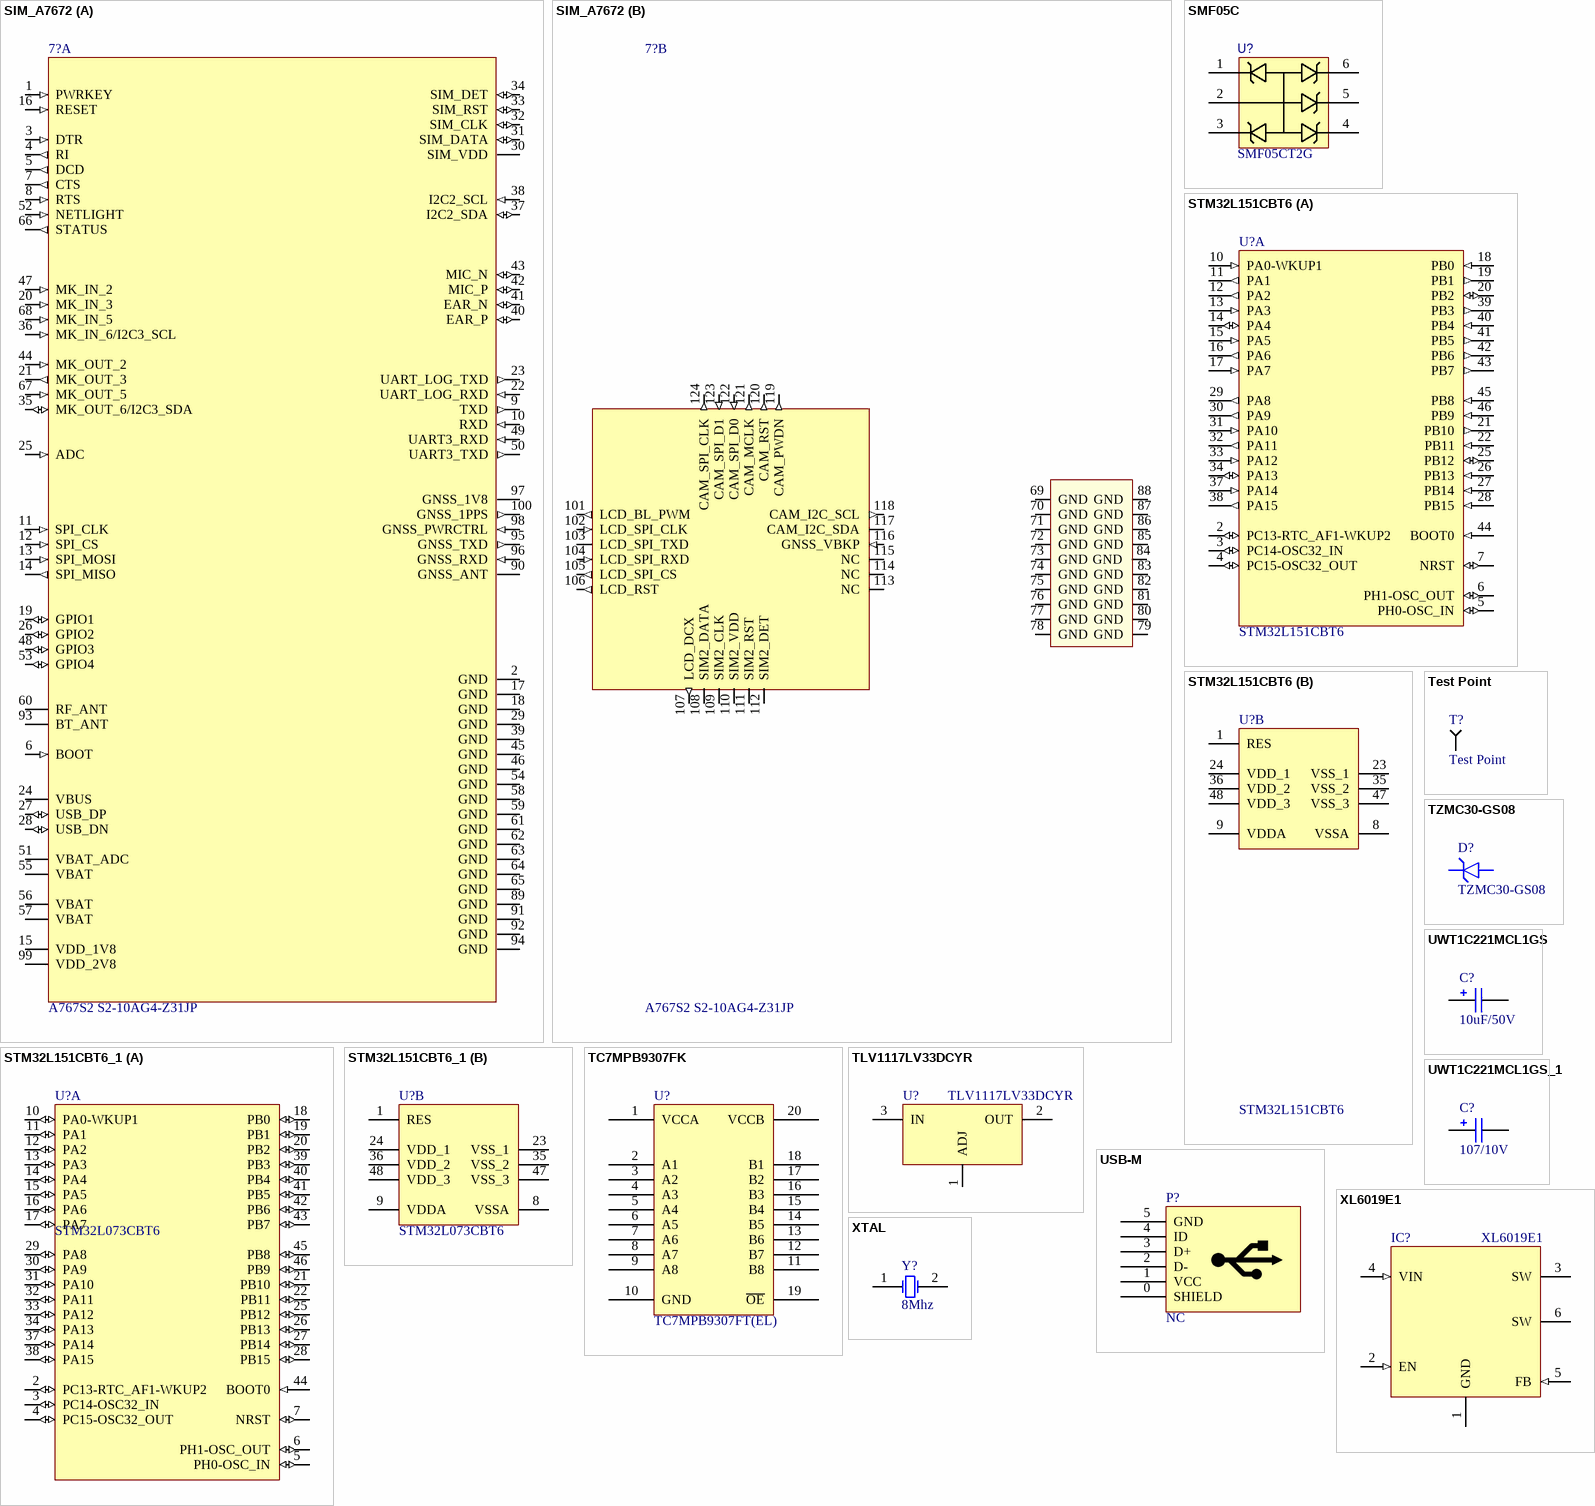
[diagram p2: symbols SIM_A7672 to XTAL]

## SIM_A7672
designator 7?, comment A767S2 S2-10AG4-Z31JP
MPN: A767S2 S2-10AG4-Z31JP; Value: A767S2 S2-10AG4-Z31JP
footprint SIM_A7672
part A pins: 1 PWRKEY (in), 2 GND (power), 3 DTR (in), 4 RI (out), 5 DCD (out), 6 BOOT (in), 7 CTS (out), 8 RTS (in), 9 TXD (out), 10 RXD (in), 11 SPI_CLK (in), 12 SPI_CS (in), 13 SPI_MOSI (in), 14 SPI_MISO (out), 15 VDD_1V8 (power), 16 RESET (in), 17 GND (power), 18 GND (power), 19 GPIO1 (io), 20 MK_IN_3 (in), 21 MK_OUT_3 (out), 22 UART_LOG_RXD (in), 23 UART_LOG_TXD (out), 24 VBUS (power), 25 ADC (in), 26 GPIO2 (io), 27 USB_DP (io), 28 USB_DN (io), 29 GND (power), 30 SIM_VDD (power), 31 SIM_DATA (io), 32 SIM_CLK (io), 33 SIM_RST (io), 34 SIM_DET (io), 35 MK_OUT_6/I2C3_SDA (io), 36 MK_IN_6/I2C3_SCL (in), 37 I2C2_SDA (io), 38 I2C2_SCL (in), 39 GND (power), 40 EAR_P (io), 41 EAR_N (io), 42 MIC_P (io), 43 MIC_N (io), 44 MK_OUT_2 (in), 45 GND (power), 46 GND (power), 47 MK_IN_2 (in), 48 GPIO3 (io), 49 UART3_RXD (in), 50 UART3_TXD (out), 51 VBAT_ADC (power), 52 NETLIGHT (in), 53 GPIO4 (io), 54 GND (power), 55 VBAT (power), 56 VBAT (power), 57 VBAT (power), 58 GND (power), 59 GND (power), 60 RF_ANT, 61 GND (power), 62 GND (power), 63 GND (power), 64 GND (power), 65 GND (power), 66 STATUS (out), 67 MK_OUT_5 (in), 68 MK_IN_5 (in), 89 GND (power), 90 GNSS_ANT, 91 GND (power), 92 GND (power), 93 BT_ANT, 94 GND (power), 95 GNSS_TXD (out), 96 GNSS_RXD (in), 97 GNSS_1V8 (power), 98 GNSS_PWRCTRL (in), 99 VDD_2V8 (power), 100 GNSS_1PPS (out)
part B pins: 69 GND (power), 70 GND (power), 71 GND (power), 72 GND (power), 73 GND (power), 74 GND (power), 75 GND (power), 76 GND (power), 77 GND (power), 78 GND (power), 79 GND (power), 80 GND (power), 81 GND (power), 82 GND (power), 83 GND (power), 84 GND (power), 85 GND (power), 86 GND (power), 87 GND (power), 88 GND (power), 101 LCD_BL_PWM (out), 102 LCD_SPI_CLK (in), 103 LCD_SPI_TXD (io), 104 LCD_SPI_RXD (in), 105 LCD_SPI_CS (out), 106 LCD_RST (out), 107 LCD_DCX (out), 108 SIM2_DATA (io), 109 SIM2_CLK (io), 110 SIM2_VDD (power), 111 SIM2_RST (io), 112 SIM2_DET (io), 113 NC, 114 NC, 115 NC, 116 GNSS_VBKP (in), 117 CAM_I2C_SDA (io), 118 CAM_I2C_SCL (out), 119 CAM_PWDN (out), 120 CAM_RST (out), 121 CAM_MCLK (out), 122 CAM_SPI_D0 (in), 123 CAM_SPI_D1 (in), 124 CAM_SPI_CLK (out)

## SMF05C
designator U?, comment SMF05CT2G
TVS Diode Array For ESD and Latch-Up Protection; Manufacturer: ON SEMICONDUCTOR; TVS Polarity: Unidirectional; Reverse Stand-Off Voltage Vrwm: 13; Breakdown Voltage Min: 6.2; Breakdown Voltage Max: 7.2; Clamping Voltage Vc Max: 21.5; Peak Pulse Current Ippm: 8; No. of Pins: 6; Supplier 1: Newark; MPN: SMF05CT2G; RoHS: YES; Stock 1: 0; Pricing 1: 6000=0.102, 15000=0.093, 30000=0.087, 75000=0.078, 150000=0.075 (USD); ComponentLink1URL: http://www.onsemi.com/pub/Collateral/SMF05C-D.PDF; ComponentLink1Description: http://www.onsemi.com/pub/Collateral/SMF05C-D.PDF; Supplier Part Number 1: 45J2265; Value: SMF05CT2G
footprint SOT65P210X140-6N (SOT23, 6-Leads, Body 2.00x2.10mm, Pitch 0.65mm, IPC Medium Density)
pins: 1 CT1, 2 AN, 3 CT2, 4 CT3, 5 CT4, 6 CT5

## STM32L151CBT6
designator U?
STM32L ARM-based EnergyLite 32-bit MCU, 128 kB Flash, 16 kB Internal RAM, -40 to +85°C Temperature, 32-pin LQFP, Tray; DatasheetVersion: rev6, Jan-2012; PackageVersion: rev13, Apr-2011; PackageReference: LQFP48; PackageDescription: 48-Pin Low-Profile Quad Flat Pack, 7 x 7 mm Body, 0.5 mm Pitch (LQFP48); ComponentLink1Description: Manufacturer URL; ComponentLink1URL: http://www.st.com/; ComponentLink2Description: STM32L151/152 Datasheet; ComponentLink2URL: http://www.st.com/internet/com/TECHNICAL_RESOURCES/TECHNICAL_LITERATURE/DATASHEET/CD00277537.pdf; ComponentLink3Description: STM32 L1 Family Web Page; ComponentLink3URL: http://www.st.com/internet/mcu/subclass/1376.jsp; Value: STM32L151CBT6; MPN: STM32L151CBT6
footprint LQFP48_N (Thin QFP, 48-Leads, Body 7x7mm, Pitch 0.5mm, IPC Medium Density)
footprint LQFP48_L (Thin QFP, 48-Leads, Body 7x7mm, Pitch 0.5mm, IPC High Density)
footprint LQFP48_M (Thin QFP, 48-Leads, Body 7x7mm, Pitch 0.5mm, IPC Low Density)
part A pins: 2 PC13-RTC_AF1-WKUP2 (io), 3 PC14-OSC32_IN (io), 4 PC15-OSC32_OUT (io), 5 PH0-OSC_IN (io), 6 PH1-OSC_OUT (io), 7 NRST (io), 10 PA0-WKUP1 (in), 11 PA1 (out), 12 PA2 (out), 13 PA3 (in), 14 PA4 (io), 15 PA5 (in), 16 PA6 (out), 17 PA7 (in), 18 PB0 (in), 19 PB1 (out), 20 PB2 (io), 21 PB10 (out), 22 PB11 (in), 25 PB12 (io), 26 PB13 (in), 27 PB14 (in), 28 PB15 (in), 29 PA8 (out), 30 PA9 (out), 31 PA10 (in), 32 PA11 (out), 33 PA12 (in), 34 PA13 (io), 37 PA14 (in), 38 PA15 (out), 39 PB3 (out), 40 PB4 (in), 41 PB5 (out), 42 PB6 (out), 43 PB7 (out), 44 BOOT0 (in), 45 PB8 (in), 46 PB9 (in)
part B pins: 1 RES (power) "Connect to VDD", 8 VSSA (power), 9 VDDA (power), 23 VSS_1 (power), 24 VDD_1 (power), 35 VSS_2 (power), 36 VDD_2 (power), 47 VSS_3 (power), 48 VDD_3 (power)

## STM32L151CBT6_1
designator U?, comment STM32L073CBT6
STM32L ARM-based EnergyLite 32-bit MCU, 128 kB Flash, 16 kB Internal RAM, -40 to +85°C Temperature, 48-pin LQFP, Tray; DatasheetVersion: rev6, Jan-2012; PackageVersion: rev13, Apr-2011; PackageReference: LQFP48; PackageDescription: 48-Pin Low-Profile Quad Flat Pack, 7 x 7 mm Body, 0.5 mm Pitch (LQFP48); ComponentLink1Description: Manufacturer URL; ComponentLink1URL: http://www.st.com/; ComponentLink2Description: STM32L151/152 Datasheet; ComponentLink2URL: http://www.st.com/internet/com/TECHNICAL_RESOURCES/TECHNICAL_LITERATURE/DATASHEET/CD00277537.pdf; ComponentLink3Description: STM32 L1 Family Web Page; ComponentLink3URL: http://www.st.com/internet/mcu/subclass/1376.jsp
footprint LQFP48_N (Thin QFP, 48-Leads, Body 7x7mm, Pitch 0.5mm, IPC Medium Density)
footprint LQFP48_L (Thin QFP, 48-Leads, Body 7x7mm, Pitch 0.5mm, IPC High Density)
footprint LQFP48_M (Thin QFP, 48-Leads, Body 7x7mm, Pitch 0.5mm, IPC Low Density)
part A pins: 2 PC13-RTC_AF1-WKUP2 (io), 3 PC14-OSC32_IN (io), 4 PC15-OSC32_OUT (io), 5 PH0-OSC_IN (io), 6 PH1-OSC_OUT (io), 7 NRST (io), 10 PA0-WKUP1 (io), 11 PA1 (io), 12 PA2 (io), 13 PA3 (io), 14 PA4 (io), 15 PA5 (io), 16 PA6 (io), 17 PA7 (io), 18 PB0 (io), 19 PB1 (io), 20 PB2 (io), 21 PB10 (io), 22 PB11 (io), 25 PB12 (io), 26 PB13 (io), 27 PB14 (io), 28 PB15 (io), 29 PA8 (io), 30 PA9 (io), 31 PA10 (io), 32 PA11 (io), 33 PA12 (io), 34 PA13 (io), 37 PA14 (io), 38 PA15 (io), 39 PB3 (io), 40 PB4 (io), 41 PB5 (io), 42 PB6 (io), 43 PB7 (io), 44 BOOT0 (in), 45 PB8 (io), 46 PB9 (io)
part B pins: 1 RES (power) "Connect to VDD", 8 VSSA (power), 9 VDDA (power), 23 VSS_1 (power), 24 VDD_1 (power), 35 VSS_2 (power), 36 VDD_2 (power), 47 VSS_3 (power), 48 VDD_3 (power)

## TC7MPB9307FK
designator U?, comment TC7MPB9307FT(EL)
IC Logic Convert 1.8V 3.3V 20-VSSOP; Manufacturer: Texas Instruments; Logic Function: Translator, Bidirectional; Number of Bits: 8; Data Rate: 100Mbps; Number of Outputs/Channel: 1; Differential - Input:Output: No/No; Propagation Delay (Max): 4ns; Voltage - Supply: 1.2 V ~ 3.6 V, 1.65 V ~ 5.5 V; Supplier 1: Digi-Key; MPN: TC7MPB9307FT(EL); RoHS: RoHS Compliant; Category: Integrated Circuits (ICs); Stock 1: 18000; Pricing 1: 2000=0.9 (USD); Packaging: Tape & Reel (TR); Input Type: Logic; Output Type: Logic; Number of Channels: 8; Operating Temperature: -40°C ~ 85°C; Package / Case: 20-TSSOP (0.173", 4.40mm Width); Supplier Device Package: 20-TSSOP; Mounting Type: Surface Mount; ComponentLink1URL: http://www.ti.com/lit/ds/symlink/txb0108.pdf; ComponentLink1Description: http://www.ti.com/lit/ds/symlink/txb0108.pdf; Supplier Part Number 1: 296-21527-2-ND; Value: TC7MPB9307FT(EL)
footprint TSOP65P640X120-20N (TSOP, 20-Leads, Body 6.50x4.40mm, Pitch 0.65mm, IPC Medium Density)
pins: 1 VCCA, 2 A1, 3 A2, 4 A3, 5 A4, 6 A5, 7 A6, 8 A7, 9 A8, 10 GND, 11 B8, 12 B7, 13 B6, 14 B5, 15 B4, 16 B3, 17 B2, 18 B1, 19 ~{OE}, 20 VCCB

## Test Point
designator T?
footprint TP SMD
footprint Test Point SMD
pins: 1

## TLV1117LV33DCYR
designator U?
800mA and 1A Low Dropout Positive Regulator 3.3V; MPN: TLV1117LV33DCYR; Value: TLV1117LV33DCYR
footprint LM1117-SOP
pins: 1 ADJ, 2 OUT, 3 IN

## TZMC30-GS08
designator D?
TZM Series 500 mW 32 V 5 % Tolerance Small Signal Zener Diode - SOD-80; Manufacturer: Vishay; Body Material: Glass; Breakdown Voltage: 30V; Current: 250mA; Element Configuration: Single; Forward Voltage: 1.5V; Impedance: 80Ω; Max Power Dissipation: 500mW; Max Reverse Leakage Current: 100nA; Number of Elements: 1; Peak Reverse Current: 2µA; Polarity: Unidirectional; Reverse Standoff Voltage: 22V; Test Current: 5mA; Tolerance: 5%; Working Voltage: 32V; Supplier 1: Arrow Electronics; MPN: TZMC30-GS08; RoHS: Compliant; Category: Zener Diodes; Stock 1: 37500; Pricing 1: 12500=0.0644, 25000=0.0562 (USD); Case/Package: SOD; China RoHS: Non-Compliant; Composition: Zener; Country of Origin: Germany, Japan; Export Control Classification Number (ECCN) Code: EAR99; Height: 1.6mm; Harmonized Tariff Schedule (HTS) Code: 8541.10.00.50; Introduction Date: 2000-08-07; Lead Free: Lead Free; Length: 3.7mm; Lifecycle Status: Production; Max Operating Temperature: 175°C; Min Operating Temperature: -65°C; Mount: Surface Mount; Number of Terminals: 2; Packaging: Cut Tape; Power Dissipation: 500mW; Radiation Hardening: No; Ratings: AEC-Q101; REACH SVHC: Unaffected; Reference Voltage: 30V; Voltage: 30V; Voltage Tolerance: 5%; Width: 1.6mm; Zener Current: 5mA; Zener Voltage: 30V; ComponentLink1URL: https://datasheet.octopart.com:443/TZMC30-GS08-Vishay-datasheet-140260254.pdf?src-supplier=Newark; ComponentLink1Description: https://datasheet.octopart.com:443/TZMC30-GS08-Vishay-datasheet-140260254.pdf?src-supplier=Newark; ComponentLink2URL: https://datasheet.octopart.com:443/TZMC30-GS08-Vishay-datasheet-68592862.pdf?src-supplier=Newark; ComponentLink2Description: https://datasheet.octopart.com:443/TZMC30-GS08-Vishay-datasheet-68592862.pdf?src-supplier=Newark; ComponentLink3URL: https://datasheet.octopart.com:443/TZMC30-GS08-Vishay-datasheet-33014479.pdf?src-supplier=Newark; ComponentLink3Description: https://datasheet.octopart.com:443/TZMC30-GS08-Vishay-datasheet-33014479.pdf?src-supplier=Newark; ComponentLink4URL: https://datasheet.octopart.com:443/TZMC30-GS08-Vishay-datasheet-21271070.pdf?src-supplier=Newark; ComponentLink4Description: https://datasheet.octopart.com:443/TZMC30-GS08-Vishay-datasheet-21271070.pdf?src-supplier=Newark; ComponentLink5URL: https://datasheet.octopart.com:443/TZMC30-GS08-Vishay-datasheet-7185.pdf?src-supplier=Newark; ComponentLink5Description: https://datasheet.octopart.com:443/TZMC30-GS08-Vishay-datasheet-7185.pdf?src-supplier=Newark; ComponentLink6URL: https://datasheet.octopart.com:443/TZMC30GS08-Vishay-datasheet-181484054.pdf?src-supplier=IHS; ComponentLink6Description: https://datasheet.octopart.com:443/TZMC30GS08-Vishay-datasheet-181484054.pdf?src-supplier=IHS; ComponentLink7URL: https://datasheet.octopart.com:443/TZMC30-GS08-Vishay-datasheet-78835411.pdf?src-supplier=Farnell; ComponentLink7Description: https://datasheet.octopart.com:443/TZMC30-GS08-Vishay-datasheet-78835411.pdf?src-supplier=Farnell; ComponentLink8URL: https://datasheet.octopart.com:443/TZMC30-GS08-Vishay-datasheet-101751705.pdf?src-supplier=Future+Electronics; ComponentLink8Description: https://datasheet.octopart.com:443/TZMC30-GS08-Vishay-datasheet-101751705.pdf?src-supplier=Future+Electronics; ComponentLink9URL: https://datasheet.octopart.com:443/TZMC30-GS08-Vishay-datasheet-13137935.pdf?src-supplier=Future+Electronics; ComponentLink9Description: https://datasheet.octopart.com:443/TZMC30-GS08-Vishay-datasheet-13137935.pdf?src-supplier=Future+Electronics; ComponentLink10URL: https://datasheet.octopart.com:443/TZMC30-GS08-Vishay-datasheet-11549796.pdf?src-supplier=Future+Electronics; ComponentLink10Description: https://datasheet.octopart.com:443/TZMC30-GS08-Vishay-datasheet-11549796.pdf?src-supplier=Future+Electronics; ComponentLink11URL: https://datasheet.octopart.com:443/TZMC30-GS08-Vishay-datasheet-8835337.pdf?src-supplier=Future+Electronics; ComponentLink11Description: https://datasheet.octopart.com:443/TZMC30-GS08-Vishay-datasheet-8835337.pdf?src-supplier=Future+Electronics; ComponentLink12URL: https://datasheet.octopart.com:443/TZMC30-GS08-Vishay-datasheet-8372199.pdf?src-supplier=Future+Electronics; ComponentLink12Description: https://datasheet.octopart.com:443/TZMC30-GS08-Vishay-datasheet-8372199.pdf?src-supplier=Future+Electronics; ComponentLink13URL: https://datasheet.octopart.com:443/TZMC30-GS08-Vishay-datasheet-5314236.pdf?src-supplier=Future+Electronics; ComponentLink13Description: https://datasheet.octopart.com:443/TZMC30-GS08-Vishay-datasheet-5314236.pdf?src-supplier=Future+Electronics; ComponentLink14URL: https://datasheet.octopart.com:443/TZMC30-GS08-Vishay-datasheet-42917902.pdf?src-supplier=TME; ComponentLink14Description: https://datasheet.octopart.com:443/TZMC30-GS08-Vishay-datasheet-42917902.pdf?src-supplier=TME; ComponentLink15URL: http://sigma.octopart.com:80/rohs_statement/Vishay-company-15.pdf?src-supplier=Compliance+Statements; ComponentLink15Description: http://sigma.octopart.com:80/rohs_statement/Vishay-company-15.pdf?src-supplier=Compliance+Statements; Supplier Part Number 1: TZMC30-GS08
footprint sod-80
pins: 1, 2

## USB-M
designator P?, comment NC
Value1: NC
footprint USB-B-Mini
footprint HDR1X4 (Connector; Header; 4 Position)
pins: 0 SHIELD, 1 VCC, 2 D-, 3 D+, 4 ID, 5 GND

## UWT1C221MCL1GS
designator C?, comment 10uF/50V
Capacitor Alum 10uF/50V SMD 5x5.4mm; Manufacturer: Nichicon; Manufacturer Part Number: UWT1C221MCL1GS; MPN: AVS106M50C12T-F; Capacitance: 220µF; Voltage Rating: 16V; Tolerance: ±20%; Lifetime @ Temp.: 1000 Hrs @ 105°C; Ripple Current: 105mA; Surface Mount Land Size: 0.260" L x 0.260" W (6.60mm x 6.60mm); Supplier 1: Digi-Key; RoHS: RoHS Compliant; Category: Capacitors; Stock 1: 45106; Pricing 1: 1=0.46, 10=0.366, 100=0.2205, 250=0.16536 (USD); Operating Temperature: -55°C ~ 105°C; Features: General Purpose; ESR (Equivalent Series Resistance): -; Impedance: -; Mounting Type: Surface Mount; Package / Case: Radial, Can - SMD; Size / Dimension: 0.248" Dia (6.30mm); Height - Seated (Max): 0.303" (7.70mm); Lead Spacing: -; Packaging: Cut Tape (CT); ComponentLink1URL: http://www.nichicon.co.jp/english/products/pdfs/e-wt.pdf; ComponentLink1Description: http://www.nichicon.co.jp/english/products/pdfs/e-wt.pdf; Supplier Part Number 1: 493-2179-1-ND; Value: 10uF/50V
footprint CAP_TANTAL_2917(7343-31) (Chip Resistor, Body 6.0x3.2mm, IPC High Density)
footprint CAP_ALUM_SMD_8062_TYPE_E
footprint CAP_ALUM_SMD_5054_TYPE_C
pins: 1, 2

## UWT1C221MCL1GS_1
designator C?, comment 107/10V
Cap Tantal 10uF/6.3V 10% 1206; Manufacturer: Nichicon; Manufacturer Part Number: UWT1C221MCL1GS; MPN: 293D106X96R3A2TE3; Capacitance: 220µF; Voltage Rating: 6.3V; Tolerance: ±20%; Lifetime @ Temp.: 1000 Hrs @ 105°C; Ripple Current: 105mA; Surface Mount Land Size: 0.260" L x 0.260" W (6.60mm x 6.60mm); Supplier 1: Digi-Key; RoHS: RoHS Compliant; Category: Capacitors; Stock 1: 45106; Pricing 1: 1=0.46, 10=0.366, 100=0.2205, 250=0.16536 (USD); Operating Temperature: -55°C ~ 105°C; Features: General Purpose; ESR (Equivalent Series Resistance): -; Impedance: -; Mounting Type: Surface Mount; Package / Case: Radial, Can - SMD; Size / Dimension: 0.248" Dia (6.30mm); Height - Seated (Max): 0.303" (7.70mm); Lead Spacing: -; Packaging: Cut Tape (CT); ComponentLink1URL: http://www.nichicon.co.jp/english/products/pdfs/e-wt.pdf; ComponentLink1Description: http://www.nichicon.co.jp/english/products/pdfs/e-wt.pdf; Supplier Part Number 1: 493-2179-1-ND; Value: 107/10V
footprint CAP_TANTAL_2917(7343-31) (Chip Resistor, Body 6.0x3.2mm, IPC High Density)
footprint CAP_TANTAL_2312(6032-28) (Chip Resistor, Body 6.0x3.2mm, IPC High Density)
pins: 1, 2

## XL6019E1
designator IC?
XL6019E1 IC Boost 5A TO-263-5; MPN: XL6019E1; Value: XL6019E1
footprint TO-263-5
pins: 1 GND (power), 2 EN (in), 3 SW (power), 4 VIN (in), 5 FB (in), 6 SW (power)

## XTAL
designator Y?, comment 8Mhz
Crystal 8Mhz 20pF SMD 5032; MPN: ABM3-8.000MHz-12-D4Y-T; Published: 8-Jun-2000; LatestRevisionDate: 17-Jul-2002; LatestRevisionNote: Re-released for DXP Platform.; PackageReference: R38; Publisher: Altium Limited; PackageDescription: Crystal, Thru-Hole; 2 Leads; Body 3.1 x 8.2 mm (Dia.xH); Value: 8Mhz
footprint CRYSTAL_SMD_2PIN-5032 (Crystal smd)
pins: 1 OSC1, 2 OSC2